# Altium schematic symbol library ICS-43434_C5656610.SchLib: 1 symbol
Pins are listed as number, name and electrical type; pins without a type are passive.

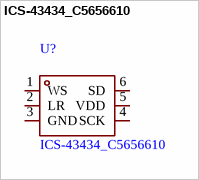
[diagram p0: symbol ICS-43434_C5656610]

## ICS-43434_C5656610
designator U?
1.65V~3.63V 停产 / 指向性:全指向 / 信噪比:64dB / 灵敏度:-26dB / 阻抗:- / 型号:ICS-43434_C5656610 / LCSC C5656610 / 厂牌:TDK InvenSense(应美盛)
footprint MIC-SMD_6P-L3.5-W2.7-P0.90-BL (PCB footprint)
pins: 1 WS, 2 LR, 3 GND, 4 SCK, 5 VDD, 6 SD